# Altium footprint library 2020-06-18_15-16-30.PcbLib: 3 footprints
Each footprint in its own frame and in the unit in brackets; x right, y up, seen from the top. Pads: shape width x height; smd on the part's side, far side on the other; paste and mask are expansions set on the pad; w line width, h text height; cw(c..) or ccw(c..) is an arc to the next point about the centre after c.
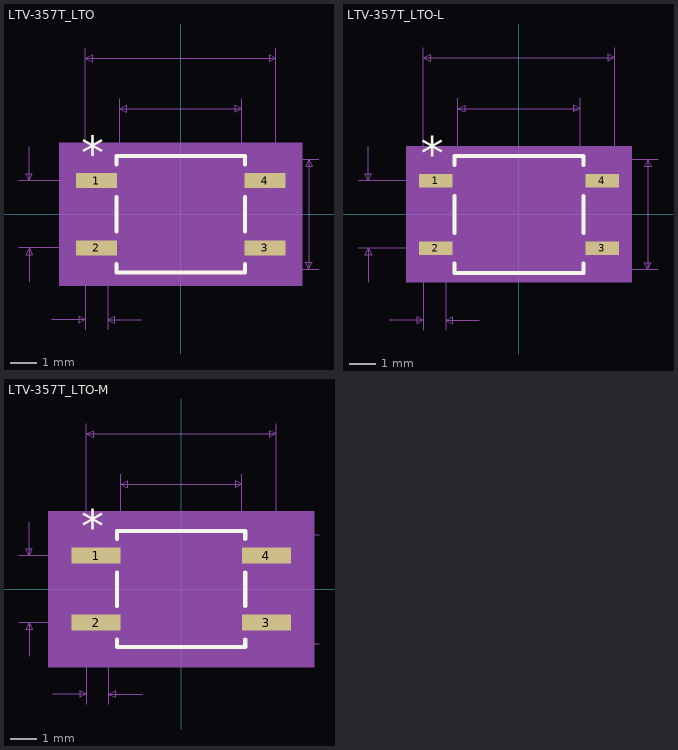
[diagram p0: the footprints below, top view; thin cyan lines are the x and y axes]

## LTV-357T_LTO [mil]
pads (4):
  rect 61x22 smd paste+0 mask+0: 1(-125,50) 2(-125,-50) 3(125,-50) 4(125,50)
Top Overlay:
  lines w6: -95.5,-74.1 -95.5,-86.5 95.5,-86.5 95.5,-74.1 ; -95.5,-25.9 -95.5,25.9 ; -95.5,74.1 -95.5,86.5 95.5,86.5 95.5,74.1 ; 95.5,-25.9 95.5,25.9
  text "*" at -147.5,67 h50
Mechanical 5:
  region: 180.5,-106.5 -180.5,-106.5 -180.5,106.5 180.5,106.5
Mechanical 7:
  lines w1: -240,-50 -125,-50 ; -240,50 -125,50 ; -225,-100 -225,-50 ; -225,100 -225,50 ; -191.5,-156.5 -141.5,-156.5 ; -141.5,-171.5 -141.5,0 -141.5,246.5 ; -108.5,-171.5 -108.5,0 ; -90.5,0 -90.5,171.5 ; -58.5,-156.5 -108.5,-156.5 ; 0,-81.5 205.5,-81.5 ; 0,81.5 205.5,81.5 ; 90.5,0 90.5,171.5 ; 141.5,0 141.5,246.5 ; -225,-50 -230,-60 -220,-60 -225,-50 ; -225,50 -230,60 -220,60 -225,50 ; -141.5,-156.5 -151.5,-151.5 -151.5,-161.5 -141.5,-156.5 ; -141.5,231.5 141.5,231.5 ; -141.5,231.5 -131.5,236.5 -131.5,226.5 -141.5,231.5 ; -108.5,-156.5 -98.5,-151.5 -98.5,-161.5 -108.5,-156.5 ; -90.5,156.5 90.5,156.5 ; -90.5,156.5 -80.5,161.5 -80.5,151.5 -90.5,156.5 ; 90.5,156.5 80.5,161.5 80.5,151.5 90.5,156.5 ; 141.5,231.5 131.5,236.5 131.5,226.5 141.5,231.5 ; 190.5,-81.5 190.5,81.5 ; 190.5,-81.5 185.5,-71.5 195.5,-71.5 190.5,-81.5 ; 190.5,81.5 185.5,71.5 195.5,71.5 190.5,81.5
  text "Default Padstyle: RX61Y22D0T" at -350,-281.5 h50
  text "Pin One Padstyle: RX61Y22D0T" at -350,-341.5 h50
  text "Alt 1 Padstyle: OX60Y90D30P" at -337.5,-521.5 h50
  text "Alt 2 Padstyle: OX90Y60D30P" at -337.5,-581.5 h50
  text "0.181in/4.597mm" at -93.75,176.5 h25
  text "0.283in/7.188mm" at -93.75,251.5 h25
  text "0.163in/4.14mm" at 210.5,-12.5 h25
  text "0.1in/2.54mm" at -395,-12.5 h25
  text "0.033in/0.838mm" at -218.75,-201.5 h25
Mechanical 13:
  lines w0: -12,81.5 ccw(c0,81.5) 12,81.5
  lines w1: -141.5,-60 -141.5,-40 -90.5,-40 -90.5,-60 -141.5,-60 ; -141.5,40 -141.5,60 -90.5,60 -90.5,40 -141.5,40 ; -90.5,-81.5 90.5,-81.5 90.5,81.5 -90.5,81.5 -90.5,-81.5 ; 90.5,-60 90.5,-40 141.5,-40 141.5,-60 90.5,-60 ; 90.5,40 90.5,60 141.5,60 141.5,40 90.5,40
  text "*" at -88,28.5 h50
Mechanical 15:
  region: -100.5,-71 -165.5,-71 -165.5,71 -100.5,71 -100.5,91.5 100.5,91.5 100.5,71 165.5,71 165.5,-71 100.5,-71 100.5,-91.5 -100.5,-91.5
  lines w6: -165.5,-71 -165.5,71 -100.5,71 -100.5,91.5 100.5,91.5 100.5,71 165.5,71 165.5,-71 100.5,-71 100.5,-91.5 -100.5,-91.5 -100.5,-71 -165.5,-71
3D body: height 10, standoff 0, extent 0,0 10,10

## LTV-357T_LTO-L [mil]
pads (4):
  rect 49x20 smd paste+0 mask+0: 1(-123,50) 2(-123,-50) 3(123,-50) 4(123,50)
Top Overlay:
  lines w6: -95.5,-72.75 -95.5,-86.5 95.5,-86.5 95.5,-72.75 ; -95.5,-27.25 -95.5,27.25 ; -95.5,72.75 -95.5,86.5 95.5,86.5 95.5,72.75 ; 95.5,-27.25 95.5,27.25
  text "*" at -145.5,65 h50
Mechanical 5:
  region: 166.5,-100.5 -166.5,-100.5 -166.5,100.5 166.5,100.5
Mechanical 7:
  lines w1: -238,-50 -123,-50 ; -238,50 -123,50 ; -223,-100 -223,-50 ; -223,100 -223,50 ; -191.5,-156.5 -141.5,-156.5 ; -141.5,-171.5 -141.5,0 -141.5,246.5 ; -108.5,-171.5 -108.5,0 ; -90.5,0 -90.5,171.5 ; -58.5,-156.5 -108.5,-156.5 ; 0,-81.5 205.5,-81.5 ; 0,81.5 205.5,81.5 ; 90.5,0 90.5,171.5 ; 141.5,0 141.5,246.5 ; -223,-50 -228,-60 -218,-60 -223,-50 ; -223,50 -228,60 -218,60 -223,50 ; -141.5,-156.5 -151.5,-151.5 -151.5,-161.5 -141.5,-156.5 ; -141.5,231.5 141.5,231.5 ; -141.5,231.5 -131.5,236.5 -131.5,226.5 -141.5,231.5 ; -108.5,-156.5 -98.5,-151.5 -98.5,-161.5 -108.5,-156.5 ; -90.5,156.5 90.5,156.5 ; -90.5,156.5 -80.5,161.5 -80.5,151.5 -90.5,156.5 ; 90.5,156.5 80.5,161.5 80.5,151.5 90.5,156.5 ; 141.5,231.5 131.5,236.5 131.5,226.5 141.5,231.5 ; 190.5,-81.5 190.5,81.5 ; 190.5,-81.5 185.5,-71.5 195.5,-71.5 190.5,-81.5 ; 190.5,81.5 185.5,71.5 195.5,71.5 190.5,81.5
  text "Default Padstyle: RX49Y20D0T" at -350,-281.5 h50
  text "Pin One Padstyle: RX49Y20D0T" at -350,-341.5 h50
  text "Alt 1 Padstyle: OX60Y90D30P" at -337.5,-521.5 h50
  text "Alt 2 Padstyle: OX90Y60D30P" at -337.5,-581.5 h50
  text "0.181in/4.597mm" at -93.75,176.5 h25
  text "0.283in/7.188mm" at -93.75,251.5 h25
  text "0.163in/4.14mm" at 210.5,-12.5 h25
  text "0.1in/2.54mm" at -393,-12.5 h25
  text "0.033in/0.838mm" at -218.75,-201.5 h25
Mechanical 13:
  lines w0: -12,81.5 ccw(c0,81.5) 12,81.5
  lines w1: -141.5,-60 -141.5,-40 -90.5,-40 -90.5,-60 -141.5,-60 ; -141.5,40 -141.5,60 -90.5,60 -90.5,40 -141.5,40 ; -90.5,-81.5 90.5,-81.5 90.5,81.5 -90.5,81.5 -90.5,-81.5 ; 90.5,-60 90.5,-40 141.5,-40 141.5,-60 90.5,-60 ; 90.5,40 90.5,60 141.5,60 141.5,40 90.5,40
  text "*" at -88,28.5 h50
Mechanical 15:
  region: -94.5,-64 -151.5,-64 -151.5,64 -94.5,64 -94.5,85.5 94.5,85.5 94.5,64 151.5,64 151.5,-64 94.5,-64 94.5,-85.5 -94.5,-85.5
  lines w6: -151.5,-64 -151.5,64 -94.5,64 -94.5,85.5 94.5,85.5 94.5,64 151.5,64 151.5,-64 94.5,-64 94.5,-85.5 -94.5,-85.5 -94.5,-64 -151.5,-64
3D body: height 10, standoff 0, extent 0,0 10,10

## LTV-357T_LTO-M [mil]
pads (4):
  rect 73x24 smd paste+0 mask+0: 1(-127,50) 2(-127,-50) 3(127,-50) 4(127,50)
Top Overlay:
  lines w6: -95.5,-75.1 -95.5,-86.5 95.5,-86.5 95.5,-75.1 ; -95.5,-24.9 -95.5,24.9 ; -95.5,75.1 -95.5,86.5 95.5,86.5 95.5,75.1 ; 95.5,-24.9 95.5,24.9
  text "*" at -149.5,69 h50
Mechanical 5:
  region: 198.5,-116.5 -198.5,-116.5 -198.5,116.5 198.5,116.5
Mechanical 7:
  lines w1: -242,-50 -127,-50 ; -242,50 -127,50 ; -227,-100 -227,-50 ; -227,100 -227,50 ; -191.5,-156.5 -141.5,-156.5 ; -141.5,-171.5 -141.5,0 -141.5,246.5 ; -108.5,-171.5 -108.5,0 ; -90.5,0 -90.5,171.5 ; -58.5,-156.5 -108.5,-156.5 ; 0,-81.5 205.5,-81.5 ; 0,81.5 205.5,81.5 ; 90.5,0 90.5,171.5 ; 141.5,0 141.5,246.5 ; -227,-50 -232,-60 -222,-60 -227,-50 ; -227,50 -232,60 -222,60 -227,50 ; -141.5,-156.5 -151.5,-151.5 -151.5,-161.5 -141.5,-156.5 ; -141.5,231.5 141.5,231.5 ; -141.5,231.5 -131.5,236.5 -131.5,226.5 -141.5,231.5 ; -108.5,-156.5 -98.5,-151.5 -98.5,-161.5 -108.5,-156.5 ; -90.5,156.5 90.5,156.5 ; -90.5,156.5 -80.5,161.5 -80.5,151.5 -90.5,156.5 ; 90.5,156.5 80.5,161.5 80.5,151.5 90.5,156.5 ; 141.5,231.5 131.5,236.5 131.5,226.5 141.5,231.5 ; 190.5,-81.5 190.5,81.5 ; 190.5,-81.5 185.5,-71.5 195.5,-71.5 190.5,-81.5 ; 190.5,81.5 185.5,71.5 195.5,71.5 190.5,81.5
  text "Default Padstyle: RX73Y24D0T" at -350,-281.5 h50
  text "Pin One Padstyle: RX73Y24D0T" at -350,-341.5 h50
  text "Alt 1 Padstyle: OX60Y90D30P" at -337.5,-521.5 h50
  text "Alt 2 Padstyle: OX90Y60D30P" at -337.5,-581.5 h50
  text "0.181in/4.597mm" at -93.75,176.5 h25
  text "0.283in/7.188mm" at -93.75,251.5 h25
  text "0.163in/4.14mm" at 210.5,-12.5 h25
  text "0.1in/2.54mm" at -397,-12.5 h25
  text "0.033in/0.838mm" at -218.75,-201.5 h25
Mechanical 13:
  lines w0: -12,81.5 ccw(c0,81.5) 12,81.5
  lines w1: -141.5,-60 -141.5,-40 -90.5,-40 -90.5,-60 -141.5,-60 ; -141.5,40 -141.5,60 -90.5,60 -90.5,40 -141.5,40 ; -90.5,-81.5 90.5,-81.5 90.5,81.5 -90.5,81.5 -90.5,-81.5 ; 90.5,-60 90.5,-40 141.5,-40 141.5,-60 90.5,-60 ; 90.5,40 90.5,60 141.5,60 141.5,40 90.5,40
  text "*" at -88,28.5 h50
Mechanical 15:
  region: -110.5,-82 -183.5,-82 -183.5,82 -110.5,82 -110.5,101.5 110.5,101.5 110.5,82 183.5,82 183.5,-82 110.5,-82 110.5,-101.5 -110.5,-101.5
  lines w6: -183.5,-82 -183.5,82 -110.5,82 -110.5,101.5 110.5,101.5 110.5,82 183.5,82 183.5,-82 110.5,-82 110.5,-101.5 -110.5,-101.5 -110.5,-82 -183.5,-82
3D body: height 10, standoff 0, extent 0,0 10,10